# Altium footprint library FootPrintLib_12.PcbLib: 319 footprints (part 6 of 20)
Each footprint in its own frame and in the unit in brackets; x right, y up, seen from the top. Pads: shape width x height; smd on the part's side, far side on the other; paste and mask are expansions set on the pad; w line width, h text height; cw(c..) or ccw(c..) is an arc to the next point about the centre after c.
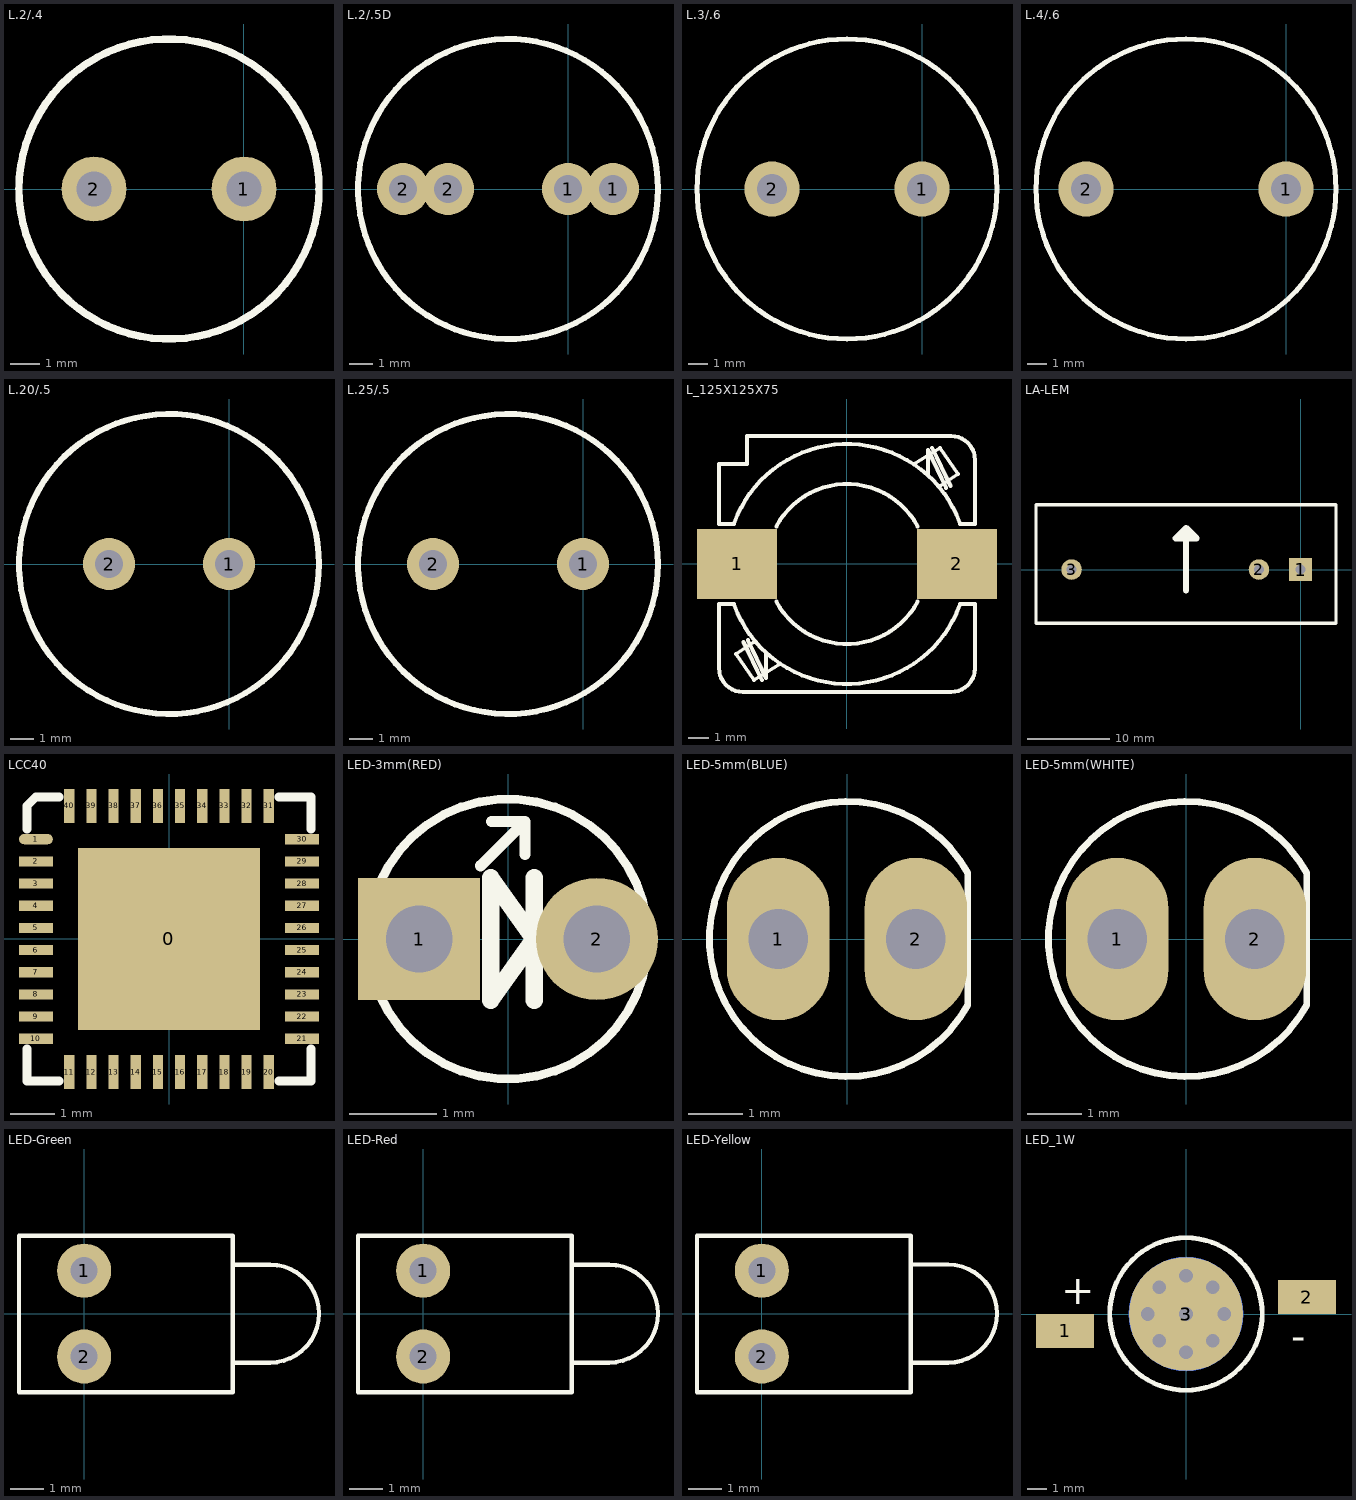
[diagram p5: the footprints below, top view; thin cyan lines are the x and y axes]

## L.2/.4 [mm]
pads (2):
  round 2.2 hole 1.2: 1(0,0) 2(-5.08,0)
Top Overlay:
  circle w0.254: c-2.54,0 r5.08

## L.2/.5D [mm]
pads (4):
  round 2.2 hole 1.2: 1(0,0) 1(1.905,0) 2(-6.985,0) 2(-5.08,0)
Top Overlay:
  circle w0.254: c-2.54,0 r6.35

## L.3/.6 [mm]
pads (2):
  round 2.8 hole 1.5: 1(0,0) 2(-7.62,0)
Top Overlay:
  circle w0.254: c-3.81,0 r7.62

## L.4/.6 [mm]
pads (2):
  round 2.8 hole 1.5: 1(0,0) 2(-10.16,0)
Top Overlay:
  circle w0.254: c-5.08,0 r7.62

## L.20/.5 [mm]
pads (2):
  round 2.2 hole 1.2: 1(0,0) 2(-5.08,0)
Top Overlay:
  circle w0.254: c-2.54,0 r6.35

## L.25/.5 [mm]
pads (2):
  round 2.2 hole 1.2: 1(0,0) 2(-6.35,0)
Top Overlay:
  circle w0.254: c-3.175,0 r6.35

## L_125X125X75 [mm] "Footprint Recommanded For TDK"
pads (2):
  rect 4x3.5 smd mask+0.1: 1(-5.5,0) 2(5.5,0)
Top Overlay:
  lines w0.2: -5.65,-2 -6.4,-2 -6.4,-5.2 ccw(c-5.2,-5.2) -5.2,-6.4 5.2,-6.4 ccw(c5.2,-5.2) 6.4,-5.2 ; -5.65,2 -6.4,2 -6.4,5 -5,5 -5,6.4 5.2,6.4 cw(c5.2,5.2) 6.4,5.2 6.4,2 5.65,2 ; -5.638,-2.052 ccw(c0,0) 5.638,-2.052 ; -5.638,2.052 cw(c0,0) 5.638,2.052 ; -5.173,-3.911 -4.259,-5.804 ; -4.96,-3.805 -4.05,-5.7 -4.05,-4.5 ; -4.65,-3.9 -5.55,-4.5 -4.65,-5.8 -3.35,-5 ; -3.532,-1.878 ccw(c0,0) 3.532,-1.878 ; -3.532,1.878 cw(c0,0) 3.532,1.878 ; 3.35,5 4.65,5.8 5.55,4.5 4.65,3.9 ; 4.05,4.5 4.05,5.7 4.96,3.805 ; 4.259,5.804 5.173,3.911 ; 5.65,-2 6.4,-2 6.4,-5.3
3D body "User Library-SLF12575T.STEP": height 8.35, standoff 0, extent -6.382,-6.25 6.387,6.25

## LA-LEM [mm]
pads (3):
  rect 2.794x2.794 hole 1.2: 1(0,0)
  round 2.5 hole 1.2: 2(-5.08,0) 3(-27.94,0)
Top Overlay:
  lines w0.381: -32.28,-6.55 -32.28,7.9 4.32,7.9 4.32,-6.55 -32.28,-6.55
  lines w0.762: -13.97,-2.54 -13.97,5.08 ; -13.97,5.08 -12.7,3.81 -15.24,3.81 -13.97,5.08

## LCC40 [mm]
height 2.54
pads (41):
  rect 4.1x4.1 smd: 0(0,0)
  oval 0.762x0.23 smd: 1(-3,2.25)
  rect 0.762x0.23 smd: 2(-3,1.75) 3(-3,1.25) 4(-3,0.75) 5(-3,0.25) 6(-3,-0.25) 7(-3,-0.75) 8(-3,-1.25) 9(-3,-1.75) 10(-3,-2.25) 21(3,-2.25) 22(3,-1.75) 23(3,-1.25) 24(3,-0.75) 25(3,-0.25) 26(3,0.25) 27(3,0.75) 28(3,1.25) 29(3,1.75) 30(3,2.25)
  rect 0.23x0.762 smd: 11(-2.25,-3) 12(-1.75,-3) 13(-1.25,-3) 14(-0.75,-3) 15(-0.25,-3) 16(0.25,-3) 17(0.75,-3) 18(1.25,-3) 19(1.75,-3) 20(2.25,-3) 31(2.25,3) 32(1.75,3) 33(1.25,3) 34(0.75,3) 35(0.25,3) 36(-0.25,3) 37(-0.75,3) 38(-1.25,3) 39(-1.75,3) 40(-2.25,3)
Top Overlay:
  lines w0.2: -3.2,-2.48 -3.2,-3.2 -2.48,-3.2 ; -3.2,2.48 -3.2,3 -3,3.2 -2.48,3.2 ; 2.48,-3.2 3.2,-3.2 3.2,-2.48 ; 2.48,3.2 3.2,3.2 3.2,2.48

## LED-3mm(RED) [mil]
height 196.85
pads (2):
  rect 55x55 hole 30: 1(-40,0)
  round 55 hole 30: 2(40,0)
Top Overlay:
  circle w3.94: c0,0 r62.99
  lines w5: -12.4,32.95 7.6,52.95 ; -7.4,52.95 7.6,52.95 ; 7.6,37.95 7.6,52.95
  lines w7.87: 11.81,-27.56 11.81,27.56 ; -7.87,-27.56 11.81,0 -7.87,27.56 -7.87,-27.56
3D body "CircuitWorks-LED DIP 3MM.step": height 221.91, standoff -112.74, extent -68.9,-75 68.9,74.61

## LED-5mm(BLUE) [mm]
pads (2):
  oval 1.9x3 hole 1.1: 1(-1.27,0) 2(1.27,0)
Top Overlay:
  lines w0.127: 2.222,-1.231 cw(c0,0) 2.222,1.231 ; 2.23,-1.22 2.23,1.22
3D body "LEDd5B.STEP": height 8.63, standoff -6.17, extent -2.888,-3.022 2.532,2.997

## LED-5mm(WHITE) [mm]
pads (2):
  oval 1.9x3 hole 1.1: 1(-1.27,0) 2(1.27,0)
Top Overlay:
  lines w0.127: 2.222,-1.231 cw(c0,0) 2.222,1.231 ; 2.23,-1.22 2.23,1.22
3D body "SW3dPS-LEDd5C.STEP": height 8.63, standoff -6.17, extent -2.888,-3.022 2.532,2.997

## LED-Green [mm] "LED 3mm Right Angle - Color Green"
pads (2):
  round 1.6 hole 0.8: 1(0,1.27) 2(0,-1.27)
Top Overlay:
  lines w0.127: 4.4,-1.45 5.5,-1.45 ccw(c5.5,0) 5.5,1.45 4.4,1.45 ; -1.927,-2.323 4.4,-2.323 4.4,2.3 -1.927,2.3 -1.927,-2.323
3D body "LEDd3YC-Green.STEP": height 7.31, standoff -2.49, extent -1.927,-2.323 6.832,2.3

## LED-Red [mm] "LED 3mm Right Angle - Color Red"
pads (2):
  round 1.6 hole 0.8: 1(0,1.27) 2(0,-1.27)
Top Overlay:
  lines w0.127: 4.4,-1.45 5.5,-1.45 ccw(c5.5,0) 5.5,1.45 4.4,1.45 ; -1.927,-2.323 4.4,-2.323 4.4,2.3 -1.927,2.3 -1.927,-2.323
3D body "LEDd3YC-Red.STEP": height 7.31, standoff -2.49, extent -1.927,-2.323 6.832,2.3

## LED-Yellow [mm] "LED 3mm Right Angle - Color Yellow"
pads (2):
  round 1.6 hole 0.8: 1(0,1.27) 2(0,-1.27)
Top Overlay:
  lines w0.127: 4.4,-1.45 5.5,-1.45 ccw(c5.5,0) 5.5,1.45 4.4,1.45 ; -1.918,-2.323 -1.918,2.3 4.4,2.3 4.4,-2.323 -1.918,-2.323
3D body "LEDd3YC-Yellow.STEP": height 7.31, standoff -2.49, extent -1.927,-2.323 6.832,2.3

## LED_1W [mil]
pads (4):
  rect 120x70 smd: 1(-250,-35) 2(250,35)
  round 236.22 smd: 3(0,0)
  round 236.22 smd far side: 3(0,0)
via 55.12,-55.12 diameter 50 hole 28
via -55.12,-55.12 diameter 50 hole 28
via -55.12,55.12 diameter 50 hole 28
via 55.12,55.12 diameter 50 hole 28
via 0,-78.74 diameter 50 hole 28
via 0,78.74 diameter 50 hole 28
via -78.74,0 diameter 50 hole 28
via 78.74,0 diameter 50 hole 28
via 0,0 diameter 50 hole 28
Top Overlay:
  circle w10: c0,0 r157.48
  text "-" at 217.51,-75 h60
  text "+" at -257.49,20 h60